# Altium schematic symbol library Integrados.SchLib: 10 symbols
Pins are listed as number, name and electrical type; pins without a type are passive.

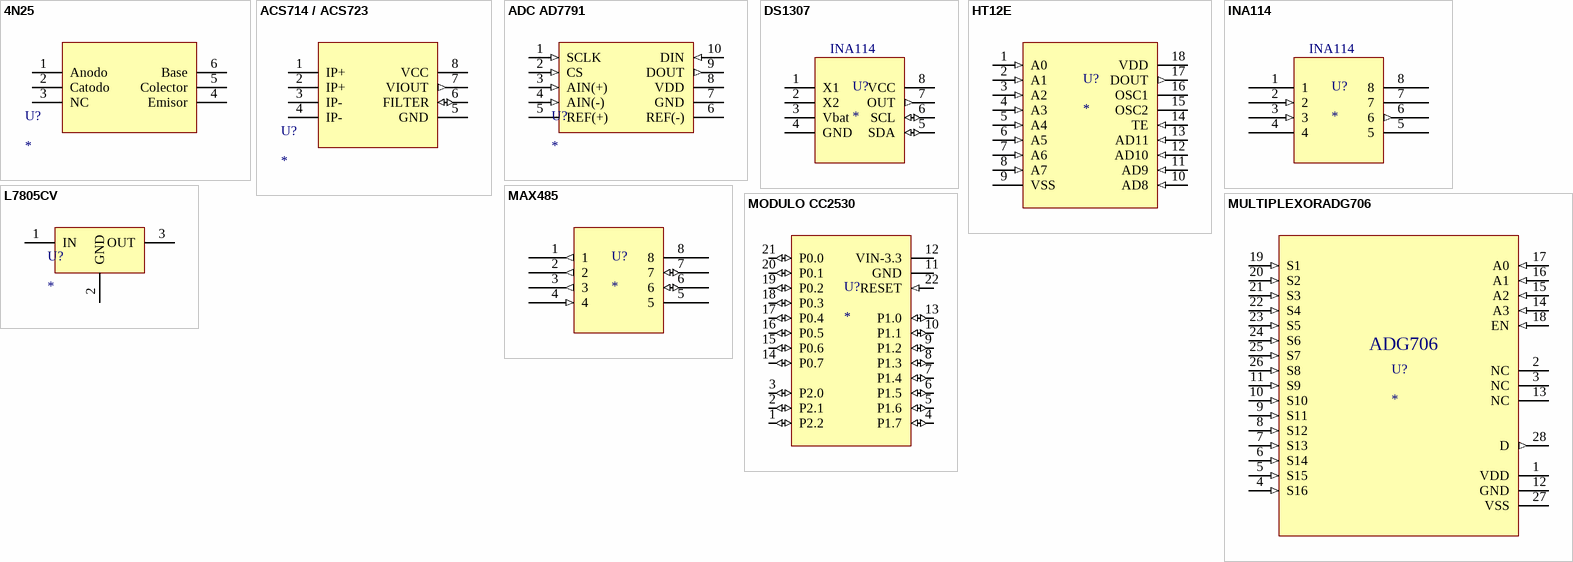
[diagram p0: symbols 4N25 to MULTIPLEXORADG706]

## 4N25
designator U?
Optoacoplador
footprint 4N25
pins: 1 Anodo "RG1", 2 Catodo "VIN-", 3 NC (power) "VIN+", 4 Emisor "VO", 5 Colector "V+", 6 Base (power) "RG2"

## ACS714 / ACS723
designator U?
Adaptador sensor de corriente
footprint ACS714/ACS723
pins: 1 IP+ "RG1", 2 IP+ "VIN-", 3 IP- (power) "VIN+", 4 IP- (power) "V-", 5 GND (power) "REF-GND", 6 FILTER (io) "VO", 7 VIOUT (out) "V+", 8 VCC (power) "RG2"

## ADC AD7791
designator U?
ADC de 24bits SPI
footprint ADC AD7791
pins: 1 SCLK (in) "RG1", 2 CS (in) "VIN-", 3 AIN(+) (in) "VIN+", 4 AIN(-) (in) "VIN+", 5 REF(+) (power) "VIN+", 6 REF(-) (power) "RG2", 7 GND (power) "VO", 8 VDD (power) "V+", 9 DOUT (out) "V+", 10 DIN (in) "V+"

## DS1307
designator U?
footprint MAX485
pins: 1 X1 "RG1", 2 X2 "VIN-", 3 Vbat (power) "VIN+", 4 GND (power) "V-", 5 SDA (io) "REF-GND", 6 SCL (io) "VO", 7 OUT (out) "V+", 8 VCC (power) "RG2"
text: INA114

## HT12E
designator U?
footprint D-18 (DIP; 18 Leads; Row Spacing 7.62 mm; Pitch 2.54 mm)
pins: 1 A0 (in) "RG1", 2 A1 (in) "VIN-", 3 A2 (in) "VIN+", 4 A3 (in) "VIN+", 5 A4 (in) "VIN+", 6 A5 (in) "RG2", 7 A6 (in) "VO", 8 A7 (in) "V+", 9 VSS (power) "V+", 10 AD8 (in) "V+", 11 AD9 (in) "V+", 12 AD10 (in) "V+", 13 AD11 (in) "V+", 14 TE (in) "V+", 15 OSC2 "V+", 16 OSC1 "V+", 17 DOUT (out) "V+", 18 VDD (power) "V+"

## INA114
designator U?
footprint MAX485
pins: 1 "RG1", 2 (in) "VIN-", 3 (in) "VIN+", 4 (power) "V-", 5 (power) "REF-GND", 6 (out) "VO", 7 (power) "V+", 8 "RG2"

## L7805CV
designator U?
Rectificador de Tension
footprint TO220_1
pins: 1 IN, 2 GND, 3 OUT

## MAX485
designator U?
footprint MAX485
pins: 1 (out) "RO", 2 (out) "RE", 3 (out) "DE", 4 (in) "DI", 5 (power) "GND", 6 (io) "A", 7 (io) "B", 8 (power) "VCC"

## MODULO CC2530
designator U?
ZigBee
footprint MODULO CC2530
pins: 1 P2.2 (io), 2 P2.1 (io), 3 P2.0 (io), 4 P1.7 (io), 5 P1.6 (io), 6 P1.5 (io), 7 P1.4 (io), 8 P1.3 (io), 9 P1.2 (io), 10 P1.1 (io), 11 GND (power), 12 VIN-3.3 (power), 13 P1.0 (io), 14 P0.7 (io), 15 P0.6 (io), 16 P0.5 (io), 17 P0.4 (io), 18 P0.3 (io), 19 P0.2 (io), 20 P0.1 (io), 21 P0.0 (io), 22 RESET (in)

## MULTIPLEXORADG706
designator U?
footprint MULTIPLEXORADG706
footprint MULTIPLEXORADG706SMD
pins: 1 VDD (power), 2 NC, 3 NC, 4 S16 (in), 5 S15 (in), 6 S14 (in), 7 S13 (in), 8 S12 (in), 9 S11 (in), 10 S10 (in), 11 S9 (in), 12 GND (power), 13 NC, 14 A3 (in), 15 A2 (in), 16 A1 (in), 17 A0 (in), 18 EN (in), 19 S1 (in), 20 S2 (in), 21 S3 (in), 22 S4 (in), 23 S5 (in), 24 S6 (in), 25 S7 (in), 26 S8 (in), 27 VSS (power), 28 D (out)
text: ADG706